# Altium schematic symbol library 2020-12-12_20-07-00.SchLib: 2 symbols
Pins are listed as number, name and electrical type; pins without a type are passive.

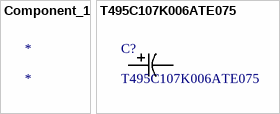
[diagram p0: symbols Component_1 to T495C107K006ATE075]

## Component_1
designator *

## T495C107K006ATE075
designator C?
No Description Available; Vendor: Kemet; SourceLibrary: Kemet_2020-03-25_3; Built_By: EMA_Frank; Source_Library: Kemet_2020-03-25_3.xlr; Type: DEV; Manufacturer_Part_Number: T495C107K006ATE075; Copyright: Copyright (C) 2018 Accelerated Designs. All rights reserved; RefDes: RefDes
footprint CAPMP6.3X3.2_2.8N_KEM
pins: 1, 2